# Altium footprint library 5V电源功率电感_Würth 7447798720.PcbLib: 1 footprints
Each footprint in its own frame and in the unit in brackets; x right, y up, seen from the top. Pads: shape width x height; smd on the part's side, far side on the other; paste and mask are expansions set on the pad; w line width, h text height; cw(c..) or ccw(c..) is an arc to the next point about the centre after c.
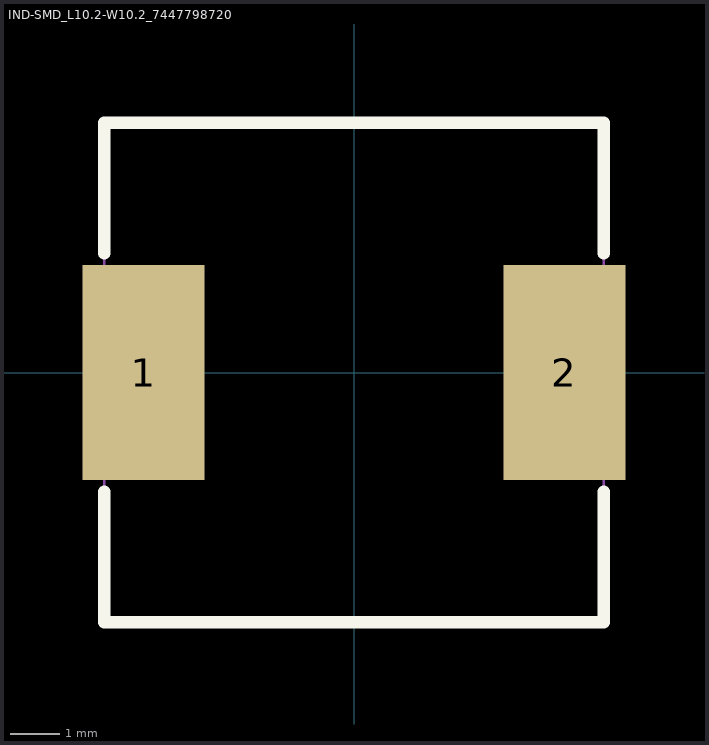
[diagram p0: the footprint, top view; thin cyan lines are the x and y axes]

## IND-SMD_L10.2-W10.2_7447798720 [mm]
pads (2):
  rect 2.5x4.4 smd: 1(-4.3,0) 2(4.3,0)
Top Overlay:
  lines w0.254: -5.1,-2.431 -5.1,-5.1 5.1,-5.1 5.1,-2.431 ; -5.1,2.431 -5.1,5.1 5.1,5.1 5.1,2.431
Mechanical 6:
  lines w0.051: -5.1,-5.1 5.1,-5.1 5.1,5.1 -5.1,5.1 -5.1,-5.1
Mechanical 8:
  region: -5.04,-5.1 -5.04,-5.125 -5.075,-5.16 -5.125,-5.16 -5.16,-5.125 -5.16,-5.1 -5.16,-5.075 -5.125,-5.04 -5.075,-5.04 -5.04,-5.075 -5.04,-5.1
Mechanical 9:
  region: 3.1,1.5 5.1,1.5 5.1,-1.5 3.1,-1.5
  region: -5.1,1.5 -3.1,1.5 -3.1,-1.5 -5.1,-1.5